# Altium footprint library Footprint.PcbLib: 154 footprints (part 9 of 10)
Each footprint in its own frame and in the unit in brackets; x right, y up, seen from the top. Pads: shape width x height; smd on the part's side, far side on the other; paste and mask are expansions set on the pad; w line width, h text height; cw(c..) or ccw(c..) is an arc to the next point about the centre after c.
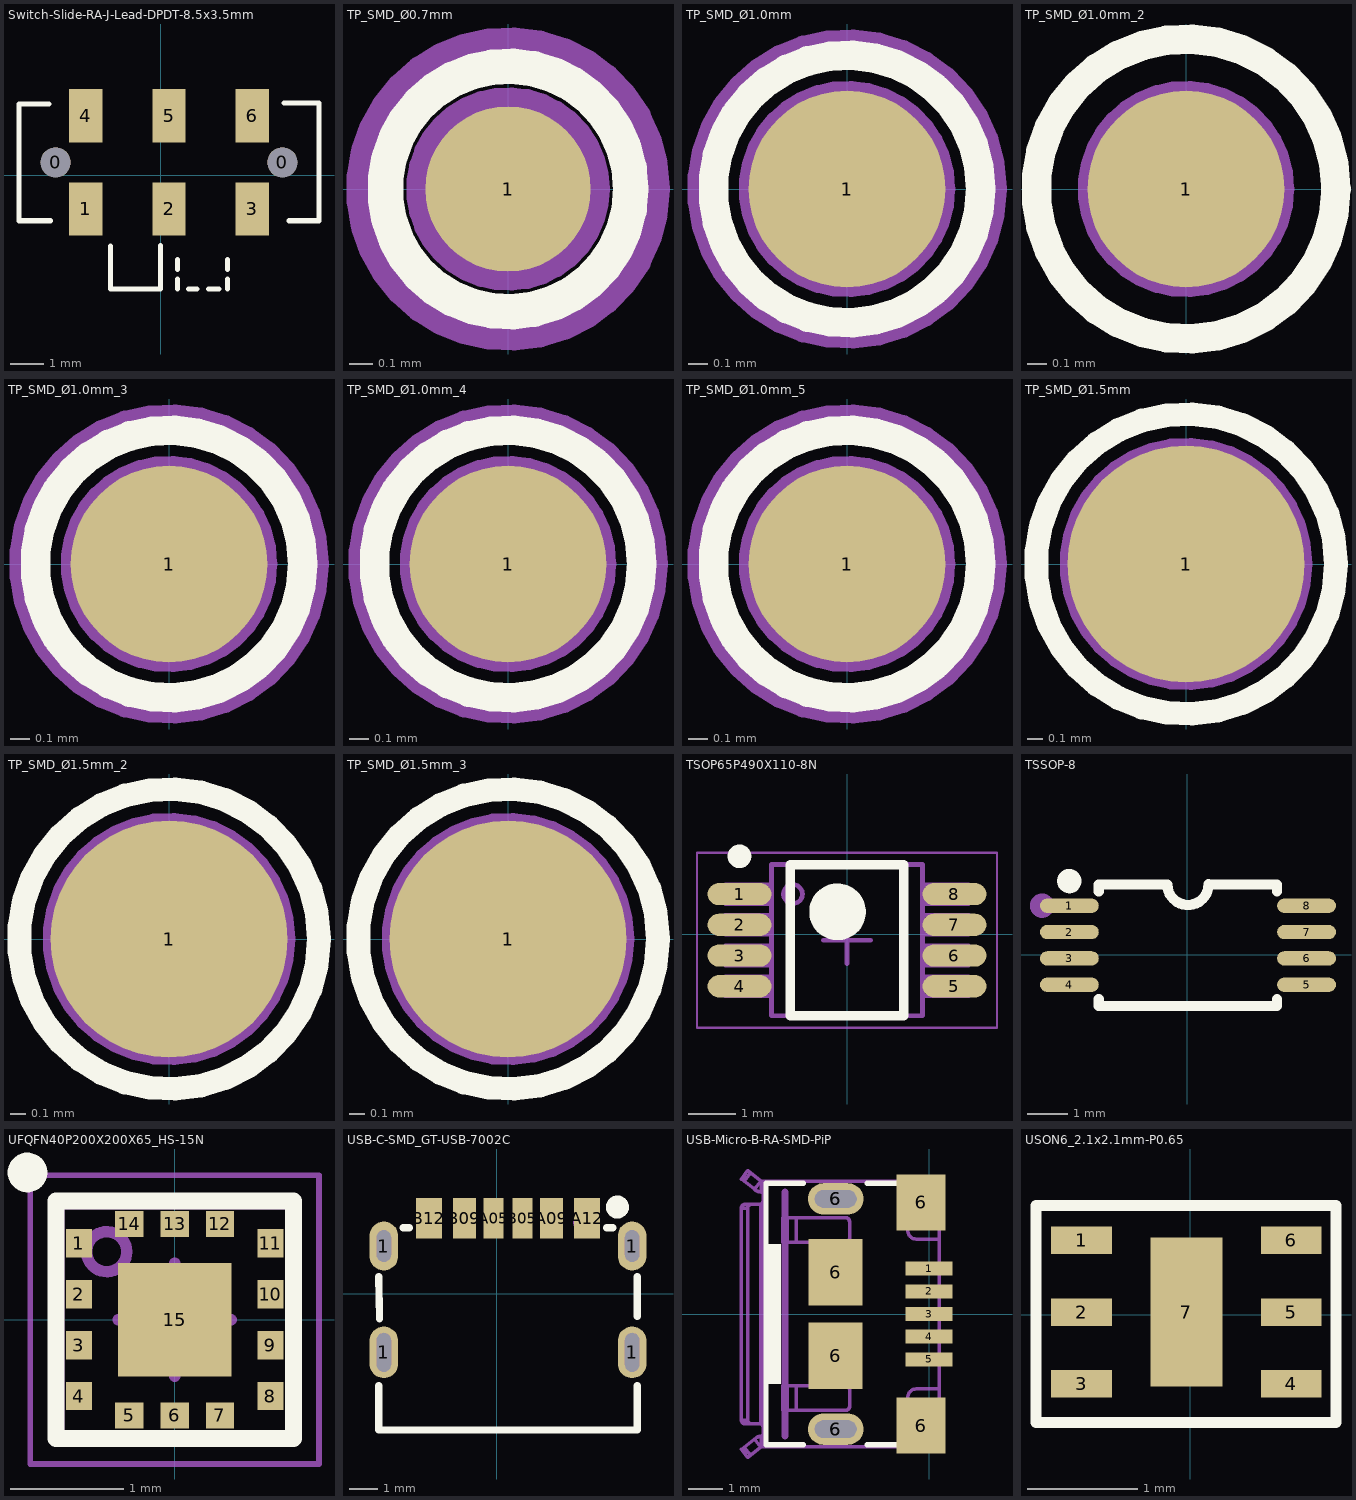
[diagram p8: the footprints below, top view; thin cyan lines are the x and y axes]

## Switch-Slide-RA-J-Lead-DPDT-8.5x3.5mm [mm]
pads (8):
  round 0.9 hole 0.9 unplated mask+0: 0(-3.146,0.381) 0(3.654,0.381)
  rect 1x1.6 smd: 1(-2.246,-1.019) 2(0.254,-1.019) 3(2.754,-1.019) 4(-2.246,1.781) 5(0.254,1.781) 6(2.754,1.781)
Top Overlay:
  lines w0.152: -3.353,2.134 -4.246,2.134 -4.246,1.24 -4.246,-1.372 -3.302,-1.372 ; -1.496,-2.134 -1.496,-3.419 0.004,-3.419 0.004,-2.108 ; 0.504,-3.419 0.504,-3.119 ; 0.504,-2.839 0.504,-2.539 ; 0.844,-3.419 1.094,-3.419 ; 1.444,-3.419 1.694,-3.419 ; 1.454,-3.419 1.754,-3.419 ; 2.004,-3.419 2.004,-3.119 ; 2.004,-2.839 2.004,-2.539 ; 3.708,2.159 4.1,2.159 4.754,2.159 4.754,1.113 4.754,-1.369 ; 3.857,-1.372 4.75,-1.372
3D body "CL-SB-22A-11T.stp": height 3.5, standoff 0, extent -3.996,-3.369 4.504,2.131

## TP_SMD_Ø0.7mm [mm]
pads (1):
  round 0.7 smd paste-5: 1(0,0)
Top Overlay:
  circle w0.15: c0,0 r0.52
Mechanical 7:
  circle w0.1: c0,0 r0.635
  circle w0.1: c0,0 r0.381
  text ".Designator" at -0.633,0.918 h0.38

## TP_SMD_Ø1.0mm [mm]
pads (1):
  round 1 smd paste-5: 1(0,0)
Top Overlay:
  circle w0.15: c0,0 r0.68
Mechanical 7:
  circle w0.1: c0,0 r0.762
  circle w0.1: c0,0 r0.5
  text ".Designator" at -0.633,0.918 h0.38

## TP_SMD_Ø1.0mm_2 [mm]
pads (1):
  round 1 smd paste-5: 1(0,0)
Top Overlay:
  circle w0.15: c0,0 r0.762
Mechanical 7:
  circle w0.1: c0,0 r0.5
  circle w0.1: c0,0 r0.762
  text ".Designator" at -0.633,0.918 h0.38

## TP_SMD_Ø1.0mm_3 [mm]
pads (1):
  round 1 smd paste-5: 1(0,0)
Top Overlay:
  circle w0.15: c0,0 r0.68
Mechanical 7:
  circle w0.1: c0,0 r0.5
  circle w0.1: c0,0 r0.762
  text ".Designator" at -0.633,0.918 h0.38

## TP_SMD_Ø1.0mm_4 [mm]
pads (1):
  round 1 smd paste-5: 1(0,0)
Top Overlay:
  circle w0.15: c0,0 r0.68
Mechanical 7:
  circle w0.1: c0,0 r0.5
  circle w0.1: c0,0 r0.762
  text ".Designator" at -0.633,0.918 h0.38

## TP_SMD_Ø1.0mm_5 [mm]
pads (1):
  round 1 smd paste-5: 1(0,0)
Top Overlay:
  circle w0.15: c0,0 r0.68
Mechanical 7:
  circle w0.1: c0,0 r0.5
  circle w0.1: c0,0 r0.762
  text ".Designator" at -0.633,0.918 h0.38

## TP_SMD_Ø1.5mm [mm]
pads (1):
  round 1.5 smd paste-5: 1(0,0)
Top Overlay:
  circle w0.15: c0,0 r0.95
Mechanical 7:
  circle w0.1: c0,0 r0.95
  circle w0.1: c0,0 r0.75
  text ".Designator" at -0.9,1.175 h0.38

## TP_SMD_Ø1.5mm_2 [mm]
pads (1):
  round 1.5 smd paste-5: 1(0,0)
Top Overlay:
  circle w0.15: c0,0 r0.95
Mechanical 7:
  circle w0.1: c0,0 r0.75
  circle w0.1: c0,0 r0.95
  text ".Designator" at -0.9,1.175 h0.38

## TP_SMD_Ø1.5mm_3 [mm]
pads (1):
  round 1.5 smd paste-5: 1(0,0)
Top Overlay:
  circle w0.15: c0,0 r0.95
Mechanical 7:
  circle w0.1: c0,0 r0.75
  circle w0.1: c0,0 r0.95
  text ".Designator" at -0.9,1.175 h0.38

## TSOP65P490X110-8N [mm]
pads (8):
  oval 1.35x0.47 smd mask+0.051: 1(-2.275,0.848) 2(-2.275,0.198) 3(-2.275,-0.452) 4(-2.275,-1.102) 5(2.275,-1.102) 6(2.275,-0.452) 7(2.275,0.198) 8(2.275,0.848)
Top Overlay:
  circle w0.6: c-0.2,0.473 r0.3
  circle w0.25: c-2.275,1.648 r0.125
  lines w0.2: -1.2,-1.727 -1.2,1.473 1.2,1.473 1.2,-1.727 -1.2,-1.727
Top Courtyard:
  lines w0.05: -3.175,-1.977 -3.175,1.723 3.175,1.723 3.175,-1.977 -3.175,-1.977
  lines w0.1: -0.5,-0.127 0.5,-0.127 ; 0,-0.627 0,0.373
Mechanical 7:
  circle w0.1: c-1.143,0.848 r0.2
  lines w0.1: -2.175,-1.302 -2.175,-0.902 ; -2.175,-0.652 -2.175,-0.252 ; -2.175,-0.002 -2.175,0.398 ; -2.175,0.648 -2.175,1.048 ; -1.6,-1.302 -2.575,-1.302 -2.575,-0.902 -1.6,-0.902 ; -1.6,-0.652 -2.575,-0.652 -2.575,-0.252 -1.6,-0.252 ; -1.6,-0.002 -2.575,-0.002 -2.575,0.398 -1.6,0.398 ; -1.6,0.648 -2.575,0.648 -2.575,1.048 -1.6,1.048 ; 1.6,-1.302 2.575,-1.302 2.575,-0.902 1.6,-0.902 ; 1.6,-0.652 2.575,-0.652 2.575,-0.252 1.6,-0.252 ; 1.6,-0.002 2.575,-0.002 2.575,0.398 1.6,0.398 ; 1.6,0.648 2.575,0.648 2.575,1.048 1.6,1.048 ; 2.175,-1.302 2.175,-0.902 ; 2.175,-0.652 2.175,-0.252 ; 2.175,-0.002 2.175,0.398 ; 2.175,0.648 2.175,1.048 ; -1.6,-1.727 -1.6,1.473 1.6,1.473 1.6,-1.727 -1.6,-1.727
  text ".Designator" at -1.525,-0.229 h0.31
3D body "TSOP65P490X110-8N.step": height 1.1, standoff 0, extent -2.45,-1.727 2.45,1.473

## TSSOP-8 [mm]
pads (8):
  oval 1.454x0.353 smd paste+0 mask+0.051: 1(-2.911,1.212) 2(-2.911,0.562) 3(-2.911,-0.088) 4(-2.911,-0.738) 5(2.943,-0.738) 6(2.943,-0.088) 7(2.943,0.562) 8(2.943,1.212)
Top Overlay:
  circle w0.3: c-2.911,1.819 r0.15
  lines w0.254: -2.184,-1.09 -2.184,-1.263 2.216,-1.263 2.216,-1.09 ; -2.184,1.565 -2.184,1.737 -0.492,1.737 ccw(c0.016,1.738) 0.524,1.739 ; 0.524,1.737 2.216,1.737 2.216,1.565
Mechanical 15:
  circle w0.3: c-3.584,1.212 r0.15
3D body "User Library-TSSOP-8.STEP": height 1.2, standoff 0, extent -3.225,-1.297 3.175,1.703

## UFQFN40P200X200X65_HS-15N [mm]
pads (30):
  rect 0.23x0.25 smd paste-1 mask+0.06: 1(-0.845,0.675) 2(-0.845,0.225) 3(-0.845,-0.225) 4(-0.845,-0.675) 8(0.845,-0.675) 9(0.845,-0.225) 10(0.845,0.225) 11(0.845,0.675)
  rect 0.25x0.23 smd paste-1 mask+0.06: 5(-0.4,-0.845) 6(0,-0.845) 7(0.4,-0.845) 12(0.4,0.845) 13(0,0.845) 14(-0.4,0.845)
  rect 1x1 smd paste-1 mask+0.06: 15(0,0)
  oval 0.23x0.25 on Top Paste: ""(-0.845,0.225) ""(-0.845,-0.675) ""(-0.845,-0.225) ""(-0.845,0.675) ""(0.845,-0.675) ""(0.845,-0.225) ""(0.845,0.225) ""(0.845,0.675)
  oval 0.25x0.23 on Top Paste: ""(-0.4,-0.845) ""(-0.4,0.845) ""(0,-0.845) ""(0,0.845) ""(0.4,-0.845) ""(0.4,0.845)
  rrect50% 0.85x0.85 on Top Paste: ""(0,0)
Top Overlay:
  circle w0.2: c-1.3,1.3 r0.075
  lines w0.15: -1.05,-1.05 -1.05,1.05 1.05,1.05 1.05,-1.05 -1.05,-1.05
Mechanical 7:
  circle w0.1: c-0.6,0.6 r0.177
  lines w0.1: -1.025,-1.025 -1.025,1.025 1.025,1.025 1.025,-1.025 -1.025,-1.025
Mechanical 15:
  lines w0.05: -1.275,-1.275 1.275,-1.275 1.275,1.275 -1.275,1.275 -1.275,-1.275
  lines w0.1: -0.5,0 0.5,0 ; 0,-0.5 0,0.5
3D body "PQFN40P200X200X65_HS-15N.step": height 0.65, standoff 0, extent -1.025,-1.025 1.025,1.025

## USB-C-SMD_GT-USB-7002C [mm]
pads (10):
  oval 1x1.8 hole 0.5 slot 1.35 at 90 deg paste-2539.97 mask+0.051: 1(-3.937,-2.032) 1(4.703,-2.032)
  oval 1x1.7 hole 0.5 slot 1.1 at 90 deg paste-2539.97 mask+0.051: 1(-3.937,1.668) 1(4.703,1.668)
  rect 0.7x1.4 smd paste-100 mask+0.051: A05(-0.117,2.638) B05(0.883,2.638)
  rect 0.8x1.4 smd paste-100 mask+0.051: A09(1.903,2.638) B09(-1.137,2.638)
  rect 0.9x1.4 smd paste-100 mask+0.051: A12(3.133,2.638) B12(-2.367,2.638)
Top Overlay:
  circle w0.4: c4.193,3.024 r0.2
  lines w0.254: -4.117,-3.191 -4.117,-4.732 4.883,-4.732 4.883,-3.191 ; -4.117,0.609 -4.089,-0.864 ; -3.266,2.308 -3.048,2.308 ; 3.814,2.308 4.032,2.308 ; 4.877,-0.787 4.883,0.609
Mechanical 15:
  circle w0.4: c3.05,2.516 r0.2
3D body "USB Type C Port (SMD Type).STEP": height 3.26, standoff -0.94, extent -4.012,-5.03 4.928,2.87

## USB-Micro-B-RA-SMD-PiP [mm]
pads (13):
  rect 1.35x0.4 smd: 1(0,1.3) 2(0,0.65) 3(0,0) 4(0,-0.65) 5(0,-1.3)
  oval 1.6x0.9 hole 0.5 slot 1.2 at 0 deg: 6(-2.675,-3.3) 6(-2.675,3.3)
  oval 2x1.5 on Top Paste: 6(-2.675,-3.3) 6(-2.675,3.3)
  rect 1.55x1.9 smd: 6(-2.675,-1.2) 6(-2.675,1.2)
  rect 1.4x1.6 smd: 6(-0.225,-3.2) 6(-0.225,3.2)
Top Overlay:
  rectangle: -4.75,-2 -4.25,2
  lines w0.152: -3.6,-3.75 -4.675,-3.75 -4.675,3.75 -3.6,3.75 ; -1.775,-3.75 0.25,-3.75 0.25,-3.275 ; -1.775,3.75 0.25,3.75 0.25,3.275
Mechanical 7:
  drawing of 2738 lines, arcs and shapes, not listed
  text ".Designator" at -4.125,-0.127 h0.38
Mechanical 15:
  lines w0.2: -4.125,-3.5 -4.125,3.5
3D body "User Library-MicroUSB-B_Molex_105017-0001.step": height 2.72, standoff -0.59, extent -5.28,-4.1 0.15,4.1

## USON6_2.1x2.1mm-P0.65 [mm]
pads (7):
  rect 0.55x0.25 smd paste+0 mask+0.025: 1(-0.984,0.675) 2(-0.984,0.025) 3(-0.984,-0.625) 4(0.916,-0.625) 5(0.916,0.025) 6(0.916,0.675)
  rect 0.65x1.35 smd paste+0 mask+0.051: 7(-0.034,0.025)
Top Overlay:
  lines w0.102: -1.397,-0.975 1.321,-0.975 1.321,0.991 -1.397,0.991 -1.397,-0.975
3D body "User Library-USON6.step": height 0.64, standoff -0.02, extent -1.034,-0.975 0.966,1.025